# Altium footprint library custom-case.PcbLib: 342 footprints (part 22 of 22)
Each footprint in its own frame and in the unit in brackets; x right, y up, seen from the top. Pads: shape width x height; smd on the part's side, far side on the other; paste and mask are expansions set on the pad; w line width, h text height; cw(c..) or ccw(c..) is an arc to the next point about the centre after c.
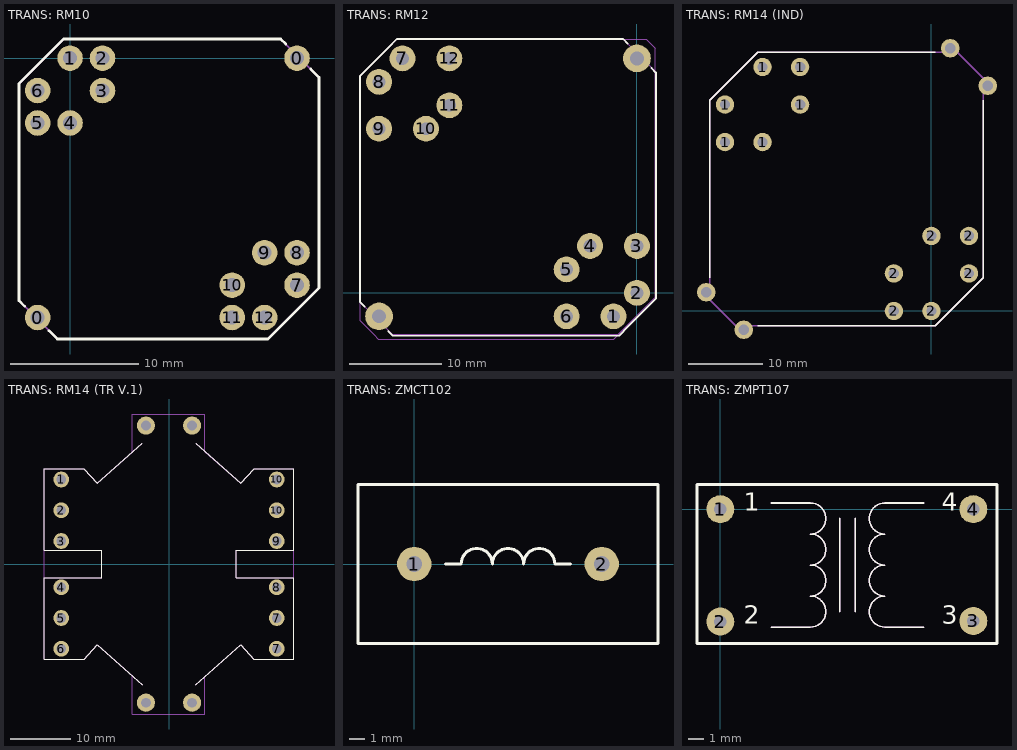
[diagram p21: the footprints below, top view; thin cyan lines are the x and y axes]

## TRANS: RM10 [mm]
height 19
pads (14):
  round 2 hole 1.1: 0(-2.54,-20.32) 0(17.78,0) 1(0,0) 2(2.54,0) 3(2.54,-2.54) 4(0,-5.08) 5(-2.54,-5.08) 6(-2.54,-2.54) 7(17.78,-17.78) 8(17.78,-15.24) 9(15.24,-15.24) 10(12.7,-17.78) 11(12.7,-20.32) 12(15.24,-20.32)
Top Overlay:
  lines w0.2: -3.55,-19.45 -4,-19 ; -1.65,-21.35 -1,-22 ; 16.9,1.1 16.5,1.5 16.28,1.5 -0.5,1.5 -4,-2 -4,-19 ; 18.85,-0.85 19.5,-1.5 19.5,-1.72 19.5,-18 15.5,-22 ; -4,-19 -4,-19 ; -1,-22 15.5,-22 ; -1,-22 -1,-22 ; 15.5,-22 15.5,-22
Top Assy:
  lines w0.1: -4,-19 -4,-2 -0.5,1.5 16.5,1.5 19.5,-1.5 19.5,-18 15.5,-22 -1,-22 -4,-19
Size Area:
  lines w0.1: -4,-19 -4,-2 -0.5,1.5 16.5,1.5 19.5,-1.5 19.5,-18 15.5,-22 -1,-22 -4,-19
3D body "RM10.STEP": height 19.27, standoff -3.22, extent -13.142,-31.019 28.511,10.635

## TRANS: RM12 [mm]
pads (14):
  round 2.8 hole 1.4: 1(-2.54,-2.54) 2(0,0) 3(0,5.08) 4(-5.08,5.08) 5(-7.62,2.54) 6(-7.62,-2.54) 7(-25.4,25.4) 8(-27.94,22.86) 9(-27.94,17.78) 10(-22.86,17.78) 11(-20.32,20.32) 12(-20.32,25.4)
  round 3 hole 1.5: ""(-27.94,-2.54) ""(0,25.4)
Top Overlay:
  lines w0.2: -29.5,-1.5 -30,-1 ; -26.94,-4.14 -26.44,-4.64 -1.94,-4.64 -0.94,-3.64 2.06,-0.64 2.06,23.86 ; -1,27 -1.5,27.5 -26,27.5 -27,26.5 -30,23.5 -30,-1 ; 1.56,24.36 2.06,23.86 ; -30,-1 -30,-1 ; 2.06,23.86 2.06,23.86
Top Assy:
  lines w0.1: -30,-1 -30,23.5 -26,27.5 -1.5,27.5 2,24 2,-0.5 -2,-4.5 -26.5,-4.5 -30,-1
Size Area:
  lines w0.1: -30,-3 -28.5,-4.5 -28,-5 -2.5,-5 2,-0.5 2,6 2,26.5 1.5,27 1,27.5 -26,27.5 -27.5,26 -30,23.5 -30,20.5 -30,-3
3D body "User Library-RM12-1.STEP": height 24.65, standoff -3.95, extent -41.68,-16.28 13.681,39.081

## TRANS: RM14 (IND) [mm]
pads (16):
  round 2.5 hole 1.4: 1(-27.94,22.86) 1(-27.94,27.94) 1(-22.86,22.86) 1(-22.86,33.02) 1(-17.78,27.94) 1(-17.78,33.02) 2(-5.08,0) 2(-5.08,5.08) 2(0,0) 2(0,10.16) 2(5.08,5.08) 2(5.08,10.16) ""(-30.48,2.54) ""(-25.4,-2.54) ""(2.54,35.56) ""(7.62,30.48)
Top Overlay:
  lines w0.2: -30,4.5 -30,28.5 -23.5,35 0.5,35 ; -23.5,-2 0.5,-2 7,4.5 7,28.5
Top Assy:
  lines w0.2: -30,1.5 -30,28.5 -23.5,35 -21,35 3.5,35 7,31.5 7,4.5 0.5,-2 -26.5,-2 -30,1.5
Size Area:
  lines w0.1: -30,1.5 -26.5,-2 0.5,-2 7,4.5 7,31.5 3.5,35 -23.5,35 -30,28.5 -30,1.5
3D body "STEP-WE-PFC-RM14-rev1.stp": height 30.1, standoff -4, extent -43.036,-15.036 20.036,48.036

## TRANS: RM14 (TR V.1) [mm]
pads (16):
  round 2.6 hole 1.6: 1(-17.78,13.97) 2(-17.78,8.89) 3(-17.78,3.81) 4(-17.78,-3.81) 5(-17.78,-8.89) 6(-17.78,-13.97) 7(17.78,-13.97) 7(17.78,-8.89) 8(17.78,-3.81) 9(17.78,3.81) 10(17.78,8.89) 10(17.78,13.97)
  round 3 hole 1.6: ""(-3.81,-22.86) ""(-3.81,22.86) ""(3.81,-22.86) ""(3.81,22.86)
Top Overlay:
  lines w0.2: -4.38,-19.93 -11.88,-13.33 -13.992,-15.73 -20.58,-15.73 -20.58,-2.23 -11.08,-2.23 -11.08,2.27 -20.58,2.27 -20.58,15.77 -14.027,15.77 -11.88,13.33 -4.38,19.93 ; 4.38,-19.93 11.88,-13.33 13.987,-15.724 20.58,-15.724 ; 4.38,19.93 11.88,13.33 14.027,15.77 20.58,15.77 20.58,2.27 11.08,2.27 11.08,-2.23 20.58,-2.23 20.58,-15.73
Top Assy:
  lines w0.1: -4.38,-19.93 -11.88,-13.33 -13.992,-15.73 -20.58,-15.73 -20.58,-2.23 -11.08,-2.23 -11.08,2.27 -20.58,2.27 -20.58,15.77 -14.027,15.77 -11.88,13.33 -4.38,19.93 ; 4.38,-19.93 11.88,-13.33 13.987,-15.724 20.58,-15.724 ; 4.38,19.93 11.88,13.33 14.027,15.77 20.58,15.77 20.58,2.27 11.08,2.27 11.08,-2.23 20.58,-2.23 20.58,-15.73
Size Area:
  lines w0.1: -20.58,-15.73 -13.992,-15.73 -11.88,-13.33 -6.08,-18.43 -6.08,-24.73 5.92,-24.73 5.92,-18.575 11.88,-13.33 13.987,-15.724 20.58,-15.724 20.58,-2.23 20.58,2.27 20.58,15.77 14.027,15.77 11.88,13.33 5.92,18.57 5.92,24.77 -6.08,24.77 -6.08,18.434 -11.88,13.33 -14.027,15.77 -20.58,15.77 -20.58,-15.73
3D body "6666.STEP": height 30.72, standoff -4.3, extent -20.5,-23.556 20.5,23.556

## TRANS: ZMCT102 [mm]
pads (2):
  round 2.2 hole 1 mask+0.075: 1(0,0) 2(12,0)
Top Overlay:
  lines w0.2: 2,0 3,0 cw(c4,0) 5,0 cw(c6,0) 7,0 cw(c8,0) 9,0 10,0 ; -3.6,-5.1 -3.6,5.1 15.6,5.1 15.6,-5.1 -3.6,-5.1
Top Assy:
  lines w0.1: 2,0 3,0 cw(c4,0) 5,0 cw(c6,0) 7,0 cw(c8,0) 9,0 10,0 ; -3.6,-5.1 -3.6,5.1 15.6,5.1 15.6,-5.1 -3.6,-5.1
Size Area:
  lines w0.1: -3.6,-5.1 -3.6,5.1 15.6,5.1 15.6,-5.1 -3.6,-5.1
3D body "ZMCT102 v2.step": height 19.7, standoff -3.9, extent -3.6,-5.1 15.6,5.1

## TRANS: ZMPT107 [mm]
pads (4):
  round 1.8 hole 0.8: 1(0,0) 2(0,-7.239) 3(16.3,-7.2) 4(16.3,0)
Top Overlay:
  lines w0.1: 3.3,-7.6 5.8,-7.6 ccw(c5.8,-6.6) 5.8,-5.6 ccw(c5.8,-4.6) 5.8,-3.6 ccw(c5.8,-2.6) 5.8,-1.6 ccw(c5.8,-0.6) 5.8,0.4 3.3,0.4 ; 7.7,-6.6 7.7,-0.6 ; 8.7,-6.6 8.7,-0.6 ; 13.1,-7.6 10.6,-7.6 cw(c10.6,-6.6) 10.6,-5.6 cw(c10.6,-4.6) 10.6,-3.6 cw(c10.6,-2.6) 10.6,-1.6 cw(c10.6,-0.6) 10.6,0.4 13.1,0.4
  lines w0.2: 9.95,1.589 17.825,1.589 17.825,-8.645 14.247,-8.645 ; 10.033,1.589 -1.5,1.589 -1.5,-8.65 5.268,-8.65 11.332,-8.65 14.247,-8.65
  text "3" at 14.25,-7.75 h2
  text "4" at 14.25,-0.5 h2
  text "2" at 1.5,-7.75 h2
  text "1" at 1.5,-0.5 h2
Top Assy:
  lines w0.1: 3.3,-7.6 5.8,-7.6 ccw(c5.8,-6.6) 5.8,-5.6 ccw(c5.8,-4.6) 5.8,-3.6 ccw(c5.8,-2.6) 5.8,-1.6 ccw(c5.8,-0.6) 5.8,0.4 3.3,0.4 ; 7.7,-6.6 7.7,-0.6 ; 8.7,-6.6 8.7,-0.6 ; 13.1,-7.6 10.6,-7.6 cw(c10.6,-6.6) 10.6,-5.6 cw(c10.6,-4.6) 10.6,-3.6 cw(c10.6,-2.6) 10.6,-1.6 cw(c10.6,-0.6) 10.6,0.4 13.1,0.4 ; -1.5,-8.65 -1.5,1.575 17.825,1.575 17.825,-8.65 -1.5,-8.65
  text "4" at 14.25,-0.5 h2
  text "3" at 14.25,-7.75 h2
  text "2" at 1.5,-7.75 h2
  text "1" at 1.5,-0.5 h2
Size Area:
  lines w0.1: -1.5,-8.65 17.825,-8.65 17.825,1.575 -1.5,1.575 -1.5,-8.65
3D body "User Library-ZMPT107.STEP": height 18.2, standoff -5.25, extent -1.495,-8.636 17.805,1.564